# Altium schematic symbol library BIblioteka.SchLib: 66 symbols (part 3 of 3)
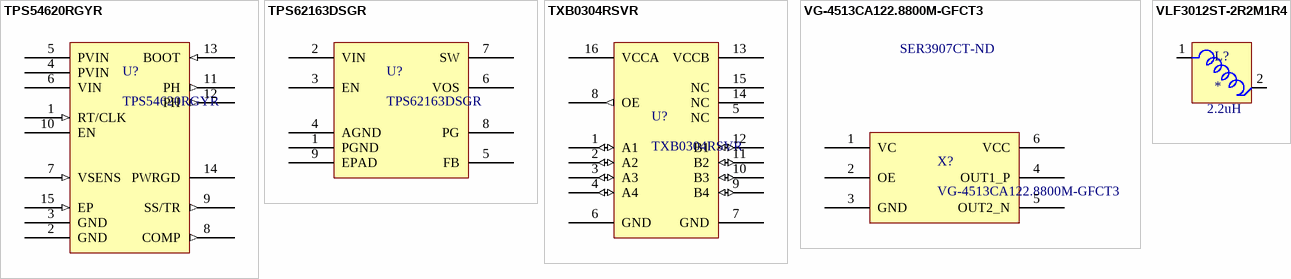
[diagram p4: symbols TPS54620RGYR to VLF3012ST-2R2M1R4]

## VLF3012ST-2R2M1R4
designator L?  Inductance: 2.2uH
FIXED IND 2.2UH 1.4A 72 MOHM SMD; Manufacturer 1: TDK; Manufacturer Part Number 1: VLF3012ST-2R2M1R4; Core Material: Ferrite; Tolerance: 20%; Shielding: Shielded; DC Resistance (DCR): 72mR; Test Frequency: 1MHz; Supplier 1: Digi-Key; Stock 1: 348; Pricing 1: 1=1.09000, 10=1.00900, 100=0.72970 (USD); RoHS: Yes; Mount: Surface Mount; Case/Package: Nonstandard; Min Operating Temperature: -40°C; Max Operating Temperature: 105°C; Packaging: Tape and Reel; Package Quantity: 2000; Current Rating: 1.4A; Composition: Wirewound; Max DC Current: 1.4A; Termination: SMD/SMT; DC Current: 1.4A; Military Standard: Not; Length: 0.118inch; Height: 1.2mm; Width: 0.11inch; Height - Seated (Max): 0.047inch; Depth: 2.8mm; Lead Free: Lead Free; ComponentLink1URL: http://components.arrow.com/part/dataview/0323_01997643?src-supplier=Arrow+Europe; ComponentLink1Description: http://components.arrow.com/part/dataview/0323_01997643?src-supplier=Arrow+Europe; ComponentLink2URL: https://media.digikey.com/pdf/Data%20Sheets/TDK%20PDFs/VLF3012S.pdf?src-supplier=Digi-Key; ComponentLink2Description: https://media.digikey.com/pdf/Data%20Sheets/TDK%20PDFs/VLF3012S.pdf?src-supplier=Digi-Key; ComponentLink3URL: http://www.tdk.com/s_details.php?class_code=TJA024&item_roots_key=VLF3012ST-2R2M1R4C46421010&item_name=VLF3012ST-2R2M1R4&src-supplier=Avnet; ComponentLink3Description: http://www.tdk.com/s_details.php?class_code=TJA024&item_roots_key=VLF3012ST-2R2M1R4C46421010&item_name=VLF3012ST-2R2M1R4&src-supplier=Avnet; ComponentLink4URL: https://product.tdk.com/en/search/inductor/inductor/smd/info?part_no=VLF3010AT-2R2M1R0&src-supplier=Mouser; ComponentLink4Description: https://product.tdk.com/en/search/inductor/inductor/smd/info?part_no=VLF3010AT-2R2M1R0&src-supplier=Mouser; Supplier Part Number 1: 445-4200-1-ND
footprint VLF3012ST-2R2M1R4 (Precision Wire Wound Inductor, 2-Leads, Body 3.00x2.80mm, IPC High Density)
pins: 1, 2